# Altium footprint library SYNCBOX_V3I1.PcbLib: 268 footprints (part 14 of 17)
Each footprint in its own frame and in the unit in brackets; x right, y up, seen from the top. Pads: shape width x height; smd on the part's side, far side on the other; paste and mask are expansions set on the pad; w line width, h text height; cw(c..) or ccw(c..) is an arc to the next point about the centre after c.
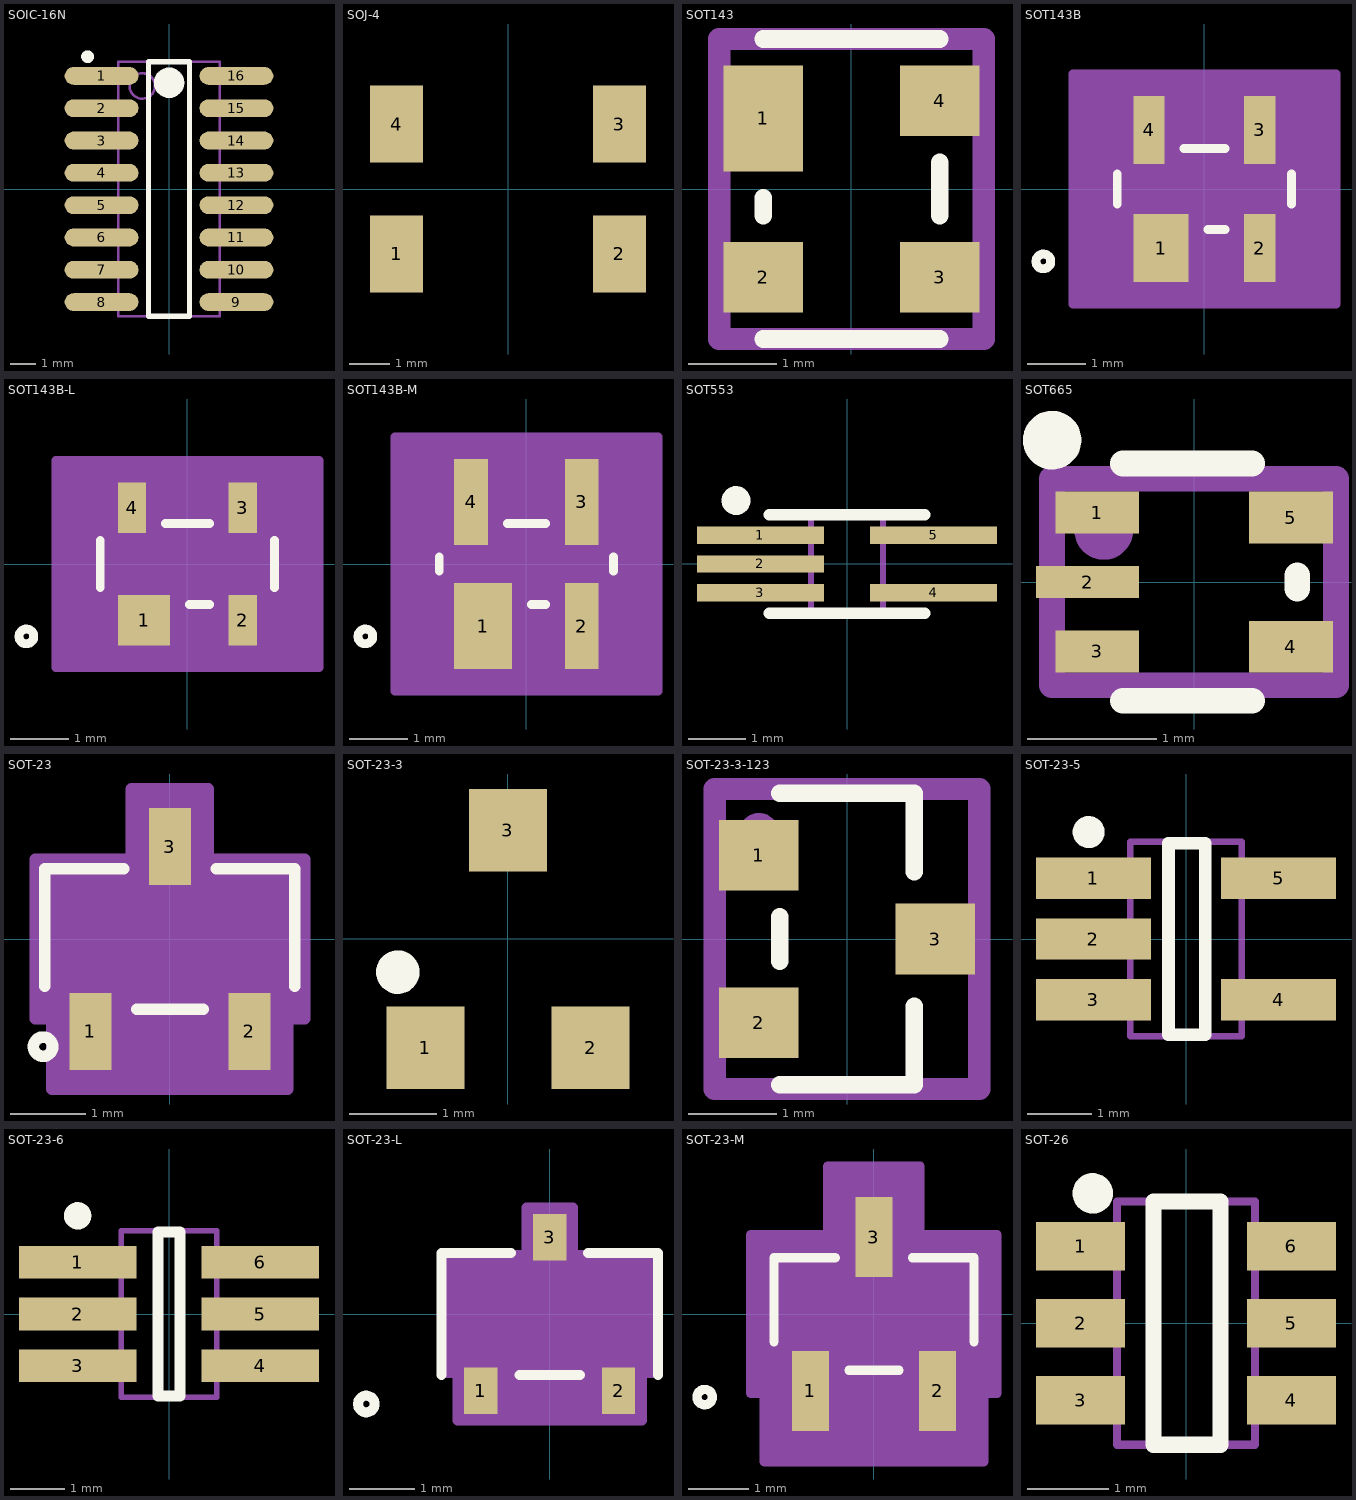
[diagram p13: the footprints below, top view; thin cyan lines are the x and y axes]

## SOIC-16N [mm]
height 1.75
pads (16):
  oval 2.9x0.7 smd: 1(-2.65,4.445) 2(-2.65,3.175) 3(-2.65,1.905) 4(-2.65,0.635) 5(-2.65,-0.635) 6(-2.65,-1.905) 7(-2.65,-3.175) 8(-2.65,-4.445) 9(2.65,-4.445) 10(2.65,-3.175) 11(2.65,-1.905) 12(2.65,-0.635) 13(2.65,0.635) 14(2.65,1.905) 15(2.65,3.175) 16(2.65,4.445)
Top Overlay:
  circle w0.6: c0,4.175 r0.3
  circle w0.25: c-3.2,5.2 r0.125
  lines w0.2: -0.8,-5 -0.8,5 0.8,5 0.8,-5 -0.8,-5
Mechanical 13:
  circle w0.1: c-1.05,4.05 r0.5
  lines w0.1: -2,-5 -2,5 2,5 2,-5 -2,-5
3D body: height 1.75, standoff 0.1, extent -2,-5 2,5

## SOJ-4 [mm]
height 2.5
pads (4):
  rect 1.3x1.9 smd: 1(-2.75,-1.6) 2(2.75,-1.6) 3(2.75,1.6) 4(-2.75,1.6)
3D body: height 2.5, standoff 0, extent -4,-1.9 4,1.9

## SOT143 [mm]
pads (4):
  rect 0.9x1.2 smd: 1(-1,0.8)
  rect 0.9x0.8 smd: 2(-1,-1) 3(1,-1) 4(1,1)
Top Overlay:
  lines w0.2: -1,-1.7 1,-1.7 ; -1,-0.3 -1,-0.1 ; -1,1.7 1,1.7 ; 1,-0.3 1,0.3
Mechanical 16:
  circle w0.254: c-1,1.1 r0.1
  lines w0.254: -1.5,-1.7 1.5,-1.7 1.5,1.7 -1.5,1.7 -1.5,-1.7
Mechanical 29:
  text ".Designator" at 0.35,-0.5 h0.6
3D body: height 1, standoff 0, extent -1,-1.7 1,1.7

## SOT143B [mil]
pads (4):
  rect 37x46 smd paste+0 mask+0: 1(-29.4,-40)
  rect 21x46 smd paste+0 mask+0: 2(37.4,-40) 3(37.4,40) 4(-37.4,40)
Top Overlay:
  circle w6: c-109,-49 r5
  lines w6: -59,-10.04 -59,10.04 ; -13.8,27.5 13.8,27.5 ; 2.2,-27.5 13.8,-27.5 ; 59,-10.04 59,10.04
Mechanical 13:
  circle w0: c-49,-17.5 r5
  lines w1: -59,-27.5 -59,27.5 59,27.5 59,-27.5 -59,-27.5 ; -46.9,-49 -11.9,-49 -11.9,-27.5 -46.9,-27.5 -46.9,-49 ; -46.9,27.5 -46.9,49 -27.9,49 -27.9,27.5 -46.9,27.5 ; 27.9,-49 46.9,-49 46.9,-27.5 27.9,-27.5 27.9,-49 ; 27.9,27.5 27.9,49 46.9,49 46.9,27.5 27.9,27.5
Mechanical 15:
  region: -89,-78 -89,78 89,78 89,-78
  lines w6: -89,-78 -89,78 89,78 89,-78 -89,-78
3D body: height 10, standoff 0, extent 0,0 10,10
3D body "SOT143B.stp": height 43.11, standoff 0, extent -59.02,-49.02 59.02,49.02

## SOT143B-L [mil]
pads (4):
  rect 35x34 smd paste+0 mask+0: 1(-29.4,-38)
  rect 19x34 smd paste+0 mask+0: 2(37.4,-38) 3(37.4,38) 4(-37.4,38)
Top Overlay:
  circle w6: c-109,-49 r5
  lines w6: -59,-15.98 -59,15.98 ; -14.8,27.5 14.8,27.5 ; 1.2,-27.5 14.8,-27.5 ; 59,-15.98 59,15.98
Mechanical 13:
  circle w0: c-49,-17.5 r5
  lines w1: -59,-27.5 -59,27.5 59,27.5 59,-27.5 -59,-27.5 ; -46.9,-49 -11.9,-49 -11.9,-27.5 -46.9,-27.5 -46.9,-49 ; -46.9,27.5 -46.9,49 -27.9,49 -27.9,27.5 -46.9,27.5 ; 27.9,-49 46.9,-49 46.9,-27.5 27.9,-27.5 27.9,-49 ; 27.9,27.5 27.9,49 46.9,49 46.9,27.5 27.9,27.5
Mechanical 15:
  region: -89,-70 -89,70 89,70 89,-70
  lines w6: -89,-70 -89,70 89,70 89,-70 -89,-70
3D body "SOT143B-L.stp": height 43.11, standoff 0, extent -59.01,-49.01 59.02,49.02
3D body: height 10, standoff 0, extent 0,0 10,10

## SOT143B-M [mil]
pads (4):
  rect 39x58 smd paste+0 mask+0: 1(-29.4,-42)
  rect 23x58 smd paste+0 mask+0: 2(37.4,-42) 3(37.4,42) 4(-37.4,42)
Top Overlay:
  circle w6: c-109,-49 r5
  lines w6: -59,-4.66 -59,4.66 ; -12.8,27.5 12.8,27.5 ; 3.2,-27.5 12.8,-27.5 ; 59,-4.66 59,4.66
Mechanical 13:
  circle w0: c-49,-17.5 r5
  lines w1: -59,-27.5 -59,27.5 59,27.5 59,-27.5 -59,-27.5 ; -46.9,-49 -11.9,-49 -11.9,-27.5 -46.9,-27.5 -46.9,-49 ; -46.9,27.5 -46.9,49 -27.9,49 -27.9,27.5 -46.9,27.5 ; 27.9,-49 46.9,-49 46.9,-27.5 27.9,-27.5 27.9,-49 ; 27.9,27.5 27.9,49 46.9,49 46.9,27.5 27.9,27.5
Mechanical 15:
  region: -89,-86 -89,86 89,86 89,-86
  lines w6: -89,-86 -89,86 89,86 89,-86 -89,-86
3D body: height 10, standoff 0, extent 0,0 10,10
3D body "SOT143B-M.stp": height 43.11, standoff 0, extent -59.01,-49.01 59.02,49.02

## SOT553 [mm]
height 0.62
pads (5):
  rect 2.2x0.3 smd mask+0.08: 1(-1.5,0.5) 2(-1.5,0) 3(-1.5,-0.5) 4(1.5,-0.5) 5(1.5,0.5)
Top Overlay:
  circle w0.25: c-1.925,1.1 r0.125
  lines w0.2: -1.35,-0.85 1.35,-0.85 ; -1.35,0.85 1.35,0.85
Mechanical 13:
  lines w0.1: -0.625,-0.85 0.625,-0.85 0.625,0.85 -0.625,0.85 -0.625,-0.85
3D body: height 0.62, standoff 0, extent -0.625,-0.85 0.625,0.85

## SOT665 [mm]
pads (5):
  rect 0.65x0.325 smd mask+0.05: 1(-0.75,0.538) 3(-0.75,-0.538)
  rect 0.8x0.25 smd mask+0.05: 2(-0.825,0)
  rect 0.65x0.4 smd mask+0.05: 4(0.75,-0.5) 5(0.75,0.5)
Top Overlay:
  circle w0.254: c-1.1,1.1 r0.1
  lines w0.2: -0.55,-0.92 0.45,-0.92 ; -0.55,0.92 0.45,0.92 ; 0.8,-0.05 0.8,0.05
Mechanical 16:
  circle w0.254: c-0.7,0.4 r0.1
  lines w0.2: -1.1,-0.8 -1.1,0.8 1.1,0.8 1.1,-0.8 -1.1,-0.8
Mechanical 29:
  text ".Designator" at 0,0.3 h0.4
3D body "SOT50P160X60-5.step": height 0.6, standoff 0, extent -0.8,-0.795 0.8,0.795

## SOT-23 [mil]
pads (3):
  rect 22x40 smd paste+0 mask+0: 1(-41.34,-48) 2(41.34,-48) 3(0,48)
Top Overlay:
  circle w6: c-66,-56 r5
  lines w6: -65,-24.64 -65,36.5 -24.1,36.5 ; -17.24,-36.5 17.24,-36.5 ; 24.1,36.5 65,36.5 65,-24.64
Mechanical 13:
  circle w0: c-50,-21.5 r5
  lines w1: -60,-31.5 -60,31.5 60,31.5 60,-31.5 -60,-31.5 ; -51.34,-54 -31.34,-54 -31.34,-31.5 -51.34,-31.5 -51.34,-54 ; -10,31.5 -10,54 10,54 10,31.5 -10,31.5 ; 31.34,-54 51.34,-54 51.34,-31.5 31.34,-31.5 31.34,-54
Mechanical 15:
  region: 60,-31.5 -60,-31.5 -60,31.5 60,31.5
  region: -70,-41.5 -70,41.5 -20,41.5 -20,78 20,78 20,41.5 70,41.5 70,-41.5 61.34,-41.5 61.34,-78 -61.34,-78 -61.34,-41.5
  lines w6: -70,-41.5 -61.34,-41.5 -61.34,-78 61.34,-78 61.34,-41.5 70,-41.5 70,41.5 20,41.5 20,78 -20,78 -20,41.5 -70,41.5 -70,-41.5
3D body: height 10, standoff 0, extent 0,0 10,10
3D body "SOT-23_J.stp": height 39.53, standoff -0.83, extent -58.07,-48.91 58.07,48.91

## SOT-23-3 [mm] "SOT-23; 3 Leads; Body 3.0 x 2.6 mm, inc. leads (LxW max)"
height 1.12
pads (3):
  rect 0.9x0.95 smd: 1(-0.95,-1.25) 2(0.95,-1.25) 3(0,1.25)
Top Overlay:
  circle w0.25: c-1.268,-0.381 r0.125
3D body "cdsot23-txxc_series.stp": height 1.03, standoff -0.03, extent -1.485,-1.201 1.435,1.099

## SOT-23-3-123 [mm]
pads (3):
  rect 0.9x0.8 smd: 1(-1,0.95) 2(-1,-0.95) 3(1,0)
Top Overlay:
  lines w0.2: -0.762,-1.651 0.762,-1.651 0.762,-0.762 ; -0.762,-0.254 -0.762,0.254 ; -0.762,1.651 0.762,1.651 0.762,0.762
Mechanical 16:
  circle w0.254: c-1,1.2 r0.1
  lines w0.254: -1.5,-1.7 1.5,-1.7 1.5,1.7 -1.5,1.7 -1.5,-1.7
Mechanical 29:
  text ".Designator" at 0.3,-0.7 h0.6
3D body: height 1.1, standoff 0, extent -0.762,-1.651 0.762,1.651
3D body: height 0.5, standoff 0, extent -1.27,0.572 -0.762,1.333
3D body: height 0.5, standoff 0, extent -1.27,-1.333 -0.762,-0.572
3D body: height 0.5, standoff 0, extent 0.762,-0.381 1.27,0.381

## SOT-23-5 [mm]
height 1.45
pads (5):
  rect 1.8x0.65 smd: 1(-1.45,0.95) 2(-1.45,0) 3(-1.45,-0.95) 4(1.45,-0.95) 5(1.45,0.95)
Top Overlay:
  circle w0.25: c-1.525,1.675 r0.125
  lines w0.2: -0.275,-1.5 0.3,-1.5 0.3,1.5 -0.275,1.5 -0.275,-1.5
Mechanical 13:
  lines w0.1: -0.875,-1.525 -0.875,1.525 0.875,1.525 0.875,-1.525 -0.875,-1.525
3D body: height 1.45, standoff 0, extent -0.875,-1.525 0.875,1.525

## SOT-23-6 [mm]
height 1.45
pads (6):
  rect 2.15x0.6 smd: 1(-1.675,0.95) 2(-1.675,0) 3(-1.675,-0.95) 4(1.675,-0.95) 5(1.675,0) 6(1.675,0.95)
Top Overlay:
  circle w0.25: c-1.675,1.8 r0.125
  lines w0.2: -0.2,-1.5 -0.2,1.5 0.2,1.5 0.2,-1.5 -0.2,-1.5
Mechanical 13:
  lines w0.1: -0.875,-1.525 0.875,-1.525 0.875,1.525 -0.875,1.525 -0.875,-1.525
3D body: height 1.45, standoff 0, extent -0.875,-1.525 0.875,1.525

## SOT-23-L [mil]
pads (3):
  rect 20x28 smd paste+0 mask+0: 1(-41.34,-46) 2(41.34,-46) 3(0,46)
Top Overlay:
  circle w6: c-110,-54 r5
  lines w6: -65,-36.5 -65,36.5 -23.1,36.5 ; -18.24,-36.5 18.24,-36.5 ; 23.1,36.5 65,36.5 65,-36.5
Mechanical 13:
  circle w0: c-50,-21.5 r5
  lines w1: -60,-31.5 60,-31.5 60,31.5 -60,31.5 -60,-31.5 ; -51.34,-54 -51.34,-31.5 -31.34,-31.5 -31.34,-54 -51.34,-54 ; -10,31.5 10,31.5 10,54 -10,54 -10,31.5 ; 31.34,-54 31.34,-31.5 51.34,-31.5 51.34,-54 31.34,-54
Mechanical 15:
  region: -64,-35.5 -64,35.5 -14,35.5 -14,64 14,64 14,35.5 64,35.5 64,-35.5 55.34,-35.5 55.34,-64 -55.34,-64 -55.34,-35.5
  region: 60,-31.5 -60,-31.5 -60,31.5 60,31.5
  lines w6: -64,-35.5 -64,35.5 -14,35.5 -14,64 14,64 14,35.5 64,35.5 64,-35.5 55.34,-35.5 55.34,-64 -55.34,-64 -55.34,-35.5 -64,-35.5
3D body "SOT-23_J.stp": height 39.53, standoff -0.83, extent -58.07,-48.91 58.07,48.91
3D body: height 10, standoff 0, extent 0,0 10,10

## SOT-23-M [mil]
pads (3):
  rect 24x52 smd paste+0 mask+0: 1(-41.34,-50) 2(41.34,-50) 3(0,50)
Top Overlay:
  circle w6: c-110,-54 r5
  lines w6: -65,-18.03 -65,36.5 -25.1,36.5 ; -16.24,-36.5 16.24,-36.5 ; 25.1,36.5 65,36.5 65,-18.03
Mechanical 13:
  circle w0: c-50,-21.5 r5
  lines w1: -60,-31.5 60,-31.5 60,31.5 -60,31.5 -60,-31.5 ; -51.34,-54 -51.34,-31.5 -31.34,-31.5 -31.34,-54 -51.34,-54 ; -10,31.5 10,31.5 10,54 -10,54 -10,31.5 ; 31.34,-54 31.34,-31.5 51.34,-31.5 51.34,-54 31.34,-54
Mechanical 15:
  region: -80,-51.5 -80,51.5 -30,51.5 -30,96 30,96 30,51.5 80,51.5 80,-51.5 71.34,-51.5 71.34,-96 -71.34,-96 -71.34,-51.5
  region: 60,-31.5 -60,-31.5 -60,31.5 60,31.5
  lines w6: -80,-51.5 -80,51.5 -30,51.5 -30,96 30,96 30,51.5 80,51.5 80,-51.5 71.34,-51.5 71.34,-96 -71.34,-96 -71.34,-51.5 -80,-51.5
3D body "SOT-23_J.stp": height 39.53, standoff -0.83, extent -58.07,-43.91 58.07,53.91
3D body: height 10, standoff 0, extent 0,0 10,10

## SOT-26 [mm] "6-Leads, 1.6MM BODY, Pitch 0,95mm, IPC Medium Density"
height 1.35
pads (6):
  rect 1.1x0.6 smd: 1(-1.3,0.95) 2(-1.3,0) 3(-1.3,-0.95) 4(1.3,-0.95) 5(1.3,0) 6(1.3,0.95)
Top Overlay:
  circle w0.25: c-1.15,1.6 r0.125
  lines w0.2: -0.4,-1.5 -0.4,1.5 0.425,1.5 0.425,-1.5 -0.4,-1.5
Mechanical 13:
  lines w0.1: -0.85,-1.5 0.85,-1.5 0.85,1.5 -0.85,1.5 -0.85,-1.5
3D body: height 1.35, standoff 0.05, extent -0.85,-1.5 0.85,1.5